# EAGLE library part FAN3227 (library madhu)
Dual Non-inverting Power MOSFET Driver
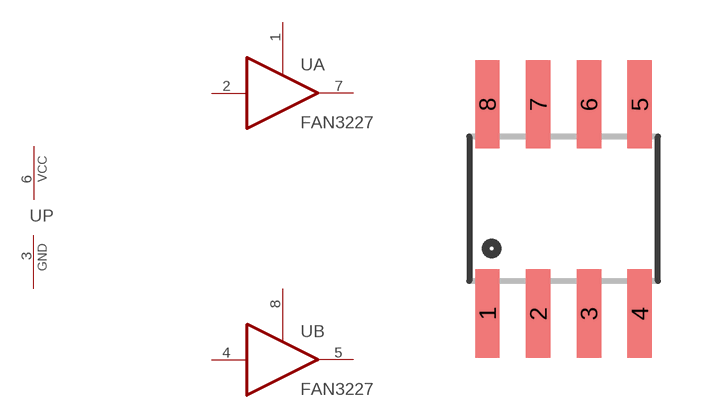
[diagram p4: symbol with the pads of SOIC-8; footprint SOIC-8]

Designator prefix U; gates A=BUFFER_EN B=BUFFER_EN P=PWRN

## FAN3227  [SOIC-8]
1  A:OE  in
2  A:I  in
3  P:GND  pwr
4  B:I  in
5  B:O  out
6  P:VCC  pwr
7  A:O  out
8  B:OE  in

## Footprint SOIC-8 (pad centres in mm)
Small Outline Package Fits JEDEC packages (narrow SOIC-8)
smd 0.61 x 2.21: 1 -1.905,-2.616; 2 -0.635,-2.616; 3 0.635,-2.616; 4 1.905,-2.616; 5 1.905,2.616; 6 0.635,2.616; 7 -0.635,2.616; 8 -1.905,2.616